# Altium schematic symbol library MAJ library.SchLib: 18 symbols
Pins are listed as number, name and electrical type; pins without a type are passive.

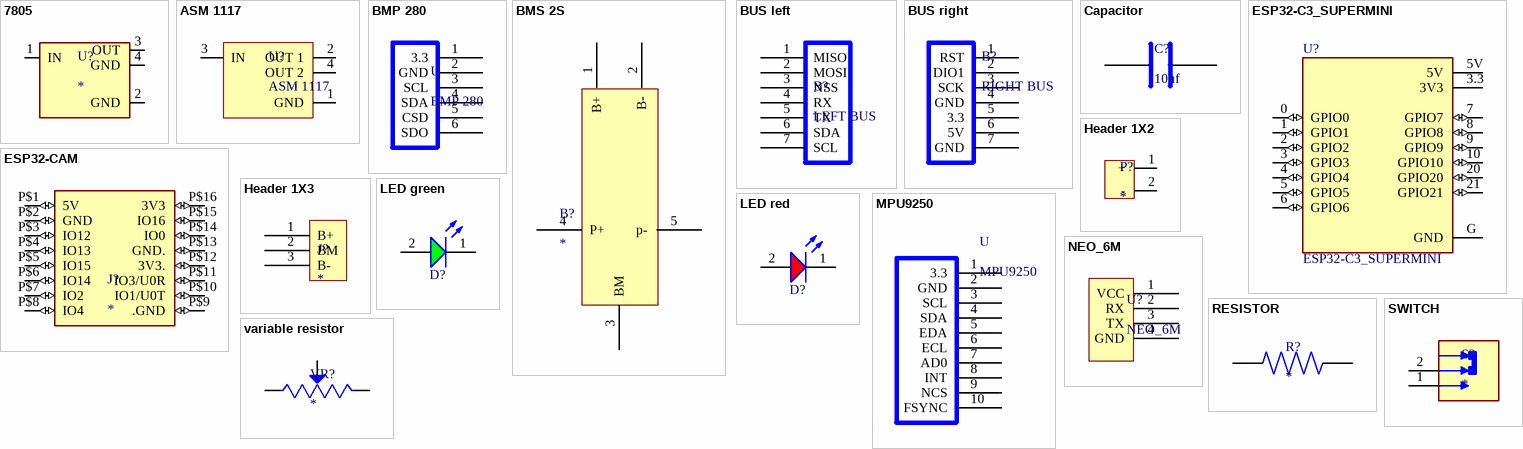
[diagram p0: symbols 7805 to variable resistor  ]

## 7805
designator U?
Linear Voltage Regulator IC 1 Output 1A SOT-223; MP: AZ1117EH-5.0TRG1; MF: Diodes Inc.; Package: SOT-223 Diodes Inc.; Digi-Key_Part_Number: AZ1117EH-5.0TRG1DICT-ND; SnapEDA_Link: https://www.snapeda.com/parts/AZ1117EH-5.0TRG1/Diodes%20Inc./view-part/795858/?ref=snap; Purchase-URL: https://pricing.snapeda.com/search/part/AZ1117EH-5.0TRG1/?ref=eda; Check_prices: https://www.snapeda.com/parts/AZ1117EH-5.0TRG1/Diodes%20Inc./view-part/795858/?ref=eda; Value: *
footprint 7805
pins: 1 IN (power), 2 GND (power), 3 OUT (power), 4 GND (power)

## ASM 1117
designator U?
footprint 7805
pins: 1  GND, 2  OUT 1, 3 IN, 4 OUT 2

## BMP 280
designator U
pins: 1 3.3, 2 GND, 3 SCL, 4 SDA, 5 CSD, 6 SDO

## BMS 2S
designator B?
footprint BMS 2S
pins: 1 B+, 2 B-, 3 BM, 4 P+, 5 p-

## BUS left
designator B?, comment LEFT BUS
footprint bus right
pins: 1 MISO, 2 MOSI, 3 NSS, 4 RX, 5 TX, 6 SDA, 7 SCL

## BUS right
designator B?, comment RIGHT BUS
footprint bus left
pins: 1 RST, 2 DIO1, 3 SCK, 4  GND, 5 3.3, 6 5V, 7 GND

## Capacitor
designator C?, comment 10uf
footprint capacitor
pins: 11, 12   

## ESP32-C3_SUPERMINI
designator U?
Super tiny ESP32-C3 board; MF: Espressif Systems; MP: ESP32-C3 SuperMini; SnapEDA_Link: https://www.snapeda.com/parts/ESP32-C3%20SuperMini/Espressif+Systems/view-part/?ref=snap; Package: Package; Value: *; Check_prices: https://www.snapeda.com/parts/ESP32-C3%20SuperMini/Espressif+Systems/view-part/?ref=eda
footprint MODULE_ESP32-C3_SUPERMINI
pins: 0 GPIO0 (io), 1 GPIO1 (io), 2 GPIO2 (io), 3 GPIO3 (io), 3.3 3V3 (power), 4 GPIO4 (io), 5 GPIO5 (io), 5V (power), 6 GPIO6 (io), 7 GPIO7 (io), 8 GPIO8 (io), 9 GPIO9 (io), 10 GPIO10 (io), 20 GPIO20 (io), 21 GPIO21 (io), G GND (power)

## ESP32-CAM
designator J?
ESP32 ESP32 Transceiver; 802.11 a/b/g/n (Wi-Fi, WiFi, WLAN), BluetoothÂ® Smart 4.x Low Energy (BLE) Evaluation Board; MF: AI-Thinker; MP: ESP32-CAM; SnapEDA_Link: https://www.snapeda.com/parts/ESP32-CAM/AI-Thinker/view-part/?ref=snap; Package: None; Value: *; Check_prices: https://www.snapeda.com/parts/ESP32-CAM/AI-Thinker/view-part/?ref=eda
footprint ESP32-CAM
pins: P$1 5V (io), P$2 GND (io), P$3 IO12 (io), P$4 IO13 (io), P$5 IO15 (io), P$6 IO14 (io), P$7 IO2 (io), P$8 IO4 (io), P$9 .GND (io), P$10 IO1/U0T (io), P$11 IO3/U0R (io), P$12 3V3. (io), P$13 GND. (io), P$14 IO0 (io), P$15 IO16 (io), P$16 3V3 (io)

## Header 1X2
designator P?
footprint Header 2 pin
pins: 1 +, 2 -

## Header 1X3
designator J?
footprint Header 1X3
pins: 1 B+, 2 BM, 3 B-

## LED green
designator D?, comment Bright Green, 2V, 140°  (value not drawn)
WL-SMCD Mono-color Chip LED Diffused, SMT, size 0603, Bright Green, 2V, 140°; Manufacturer Part Number: 150060VS55040; Manufacturer: Wurth Elektronik; Case/Size Code: 0603; Chip Technology: AlInGaP; Dominant Wavelength: 573nm; Luminous Intensity: 60mcd; Peak Wavelength: 575nm; Category: Signal LEDs; Match Code: WL-SMCD; ComponentLink1Description: Website Link; ComponentLink1URL: https://www.we-online.com/redexpert/article/150060VS55040?ad; ComponentLink2Description: Datasheet Link; ComponentLink2URL: https://www.we-online.com/redexpert/spec/150060VS55040?ad; Mount: Surface Mount; Operating Temperature Max: 85°C; Operating Temperature Min: -40°C; Packaging: Tape and Reel; Length: 1.6mm; Width: 0.8mm; Height: 0.4mm; Emitting Color: Bright Green; Forward Voltage: 2V; Viewing Angle: 140°
footprint LED green (SMD Mono-color Chip LED, body 1.6x0.8mm)
pins: 1 K, 2 A

## LED red
designator D?, comment Super Red, 2V, 140°  (value not drawn)
WL-SMCD Mono-color Chip LED Diffused, SMT, size 0603, Super Red, 2V, 140°; Manufacturer Part Number: 150060SS55040; Manufacturer: Wurth Elektronik; Case/Size Code: 0603; Chip Technology: AlInGaP; Dominant Wavelength: 630nm; Luminous Intensity: 70mcd; Peak Wavelength: 645nm; Category: Signal LEDs; Match Code: WL-SMCD; ComponentLink1Description: Website Link; ComponentLink1URL: https://www.we-online.com/redexpert/article/150060SS55040?ad; ComponentLink2Description: Datasheet Link; ComponentLink2URL: https://www.we-online.com/redexpert/spec/150060SS55040?ad; Mount: Surface Mount; Operating Temperature Max: 85°C; Operating Temperature Min: -40°C; Packaging: Tape and Reel; Length: 1.6mm; Width: 0.8mm; Height: 0.4mm; Emitting Color: Super Red; Forward Voltage: 2V; Viewing Angle: 140°
footprint LED red (SMD Mono-color Chip LED, body 1.6x0.8mm)
pins: 1 K, 2 A

## MPU9250
designator U
pins: 1 3.3, 2 GND, 3 SCL, 4 SDA, 5 EDA, 6 ECL, 7 AD0, 8 INT, 9 NCS, 10 FSYNC

## NEO_6M
designator U?
pins: 1 VCC, 2 RX, 3 TX, 4 GND

## RESISTOR
designator R?
RES SMD 270 OHM 5% 0.4W 0805; MP: ESR10EZPJ271; Package: None; Price: None; Value: *; Availability: Unavailable
footprint RESISTOR
pins: 1, 2

## SWITCH
designator S?
Slide Switch SPST Through Hole; MF: C&K; MP: S101031MS02Q; SnapEDA_Link: https://www.snapeda.com/parts/S101031MS02Q/C%2526K/view-part/?ref=snap; Purchase-URL: https://pricing.snapeda.com/search/part/S101031MS02Q/?ref=eda; Package: None; Price: None; Availability: In Stock; Value: *; Check_prices: https://www.snapeda.com/parts/S101031MS02Q/C%2526K/view-part/?ref=eda
footprint SWITCH
pins: 1, 2

## variable resistor  
designator VR?
Trimmer Resistors - Through Hole; MP: 3296W-FM1-502; MF: Bourns; Availability: Warning; SnapEDA_Link: https://www.snapeda.com/parts/3296W-FM1-502/Bourns/view-part/3211169/?ref=snap; Package: None; Price: None; Value: *; Check_prices: https://www.snapeda.com/parts/3296W-FM1-502/Bourns/view-part/3211169/?ref=eda
footprint TRIM_3296W-FM1-502
pins: 1 CCW, 2 WIPER, 3 CW